# Altium footprint library Eduard.PcbLib: 54 footprints (part 2 of 4)
Each footprint in its own frame and in the unit in brackets; x right, y up, seen from the top. Pads: shape width x height; smd on the part's side, far side on the other; paste and mask are expansions set on the pad; w line width, h text height; cw(c..) or ccw(c..) is an arc to the next point about the centre after c.
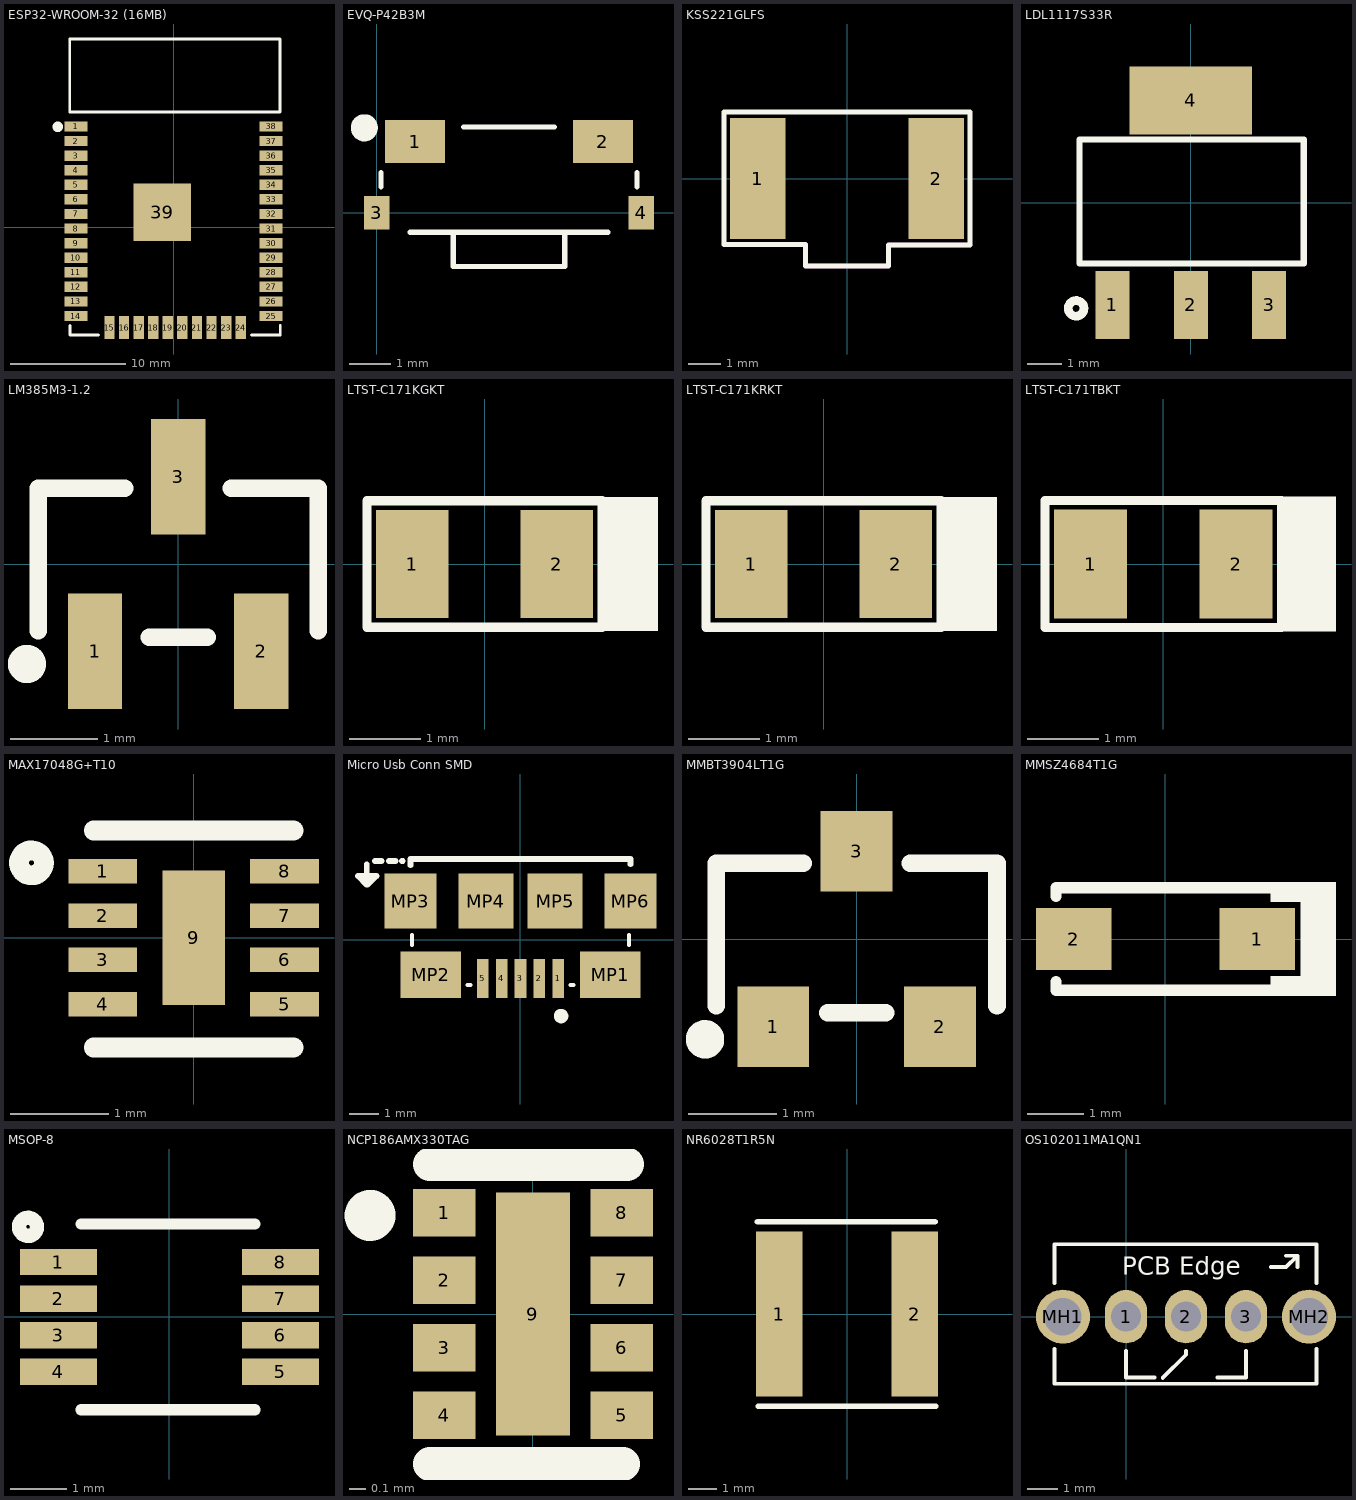
[diagram p1: the footprints below, top view; thin cyan lines are the x and y axes]

## ESP32-WROOM-32 (16MB) [mm]
pads (39):
  rect 2x0.9 smd: 1(-8.5,8.755) 2(-8.5,7.485) 3(-8.5,6.215) 4(-8.5,4.945) 5(-8.5,3.675) 6(-8.5,2.405) 7(-8.5,1.135) 8(-8.5,-0.135) 9(-8.5,-1.405) 10(-8.5,-2.675) 11(-8.5,-3.945) 12(-8.5,-5.215) 13(-8.5,-6.485) 14(-8.5,-7.755) 25(8.5,-7.755) 26(8.5,-6.485) 27(8.5,-5.215) 28(8.5,-3.945) 29(8.5,-2.675) 30(8.5,-1.405) 31(8.5,-0.135) 32(8.5,1.135) 33(8.5,2.405) 34(8.5,3.675) 35(8.5,4.945) 36(8.5,6.215) 37(8.5,7.485) 38(8.5,8.755)
  rect 0.9x2 smd: 15(-5.58,-8.755) 16(-4.31,-8.755) 17(-3.04,-8.755) 18(-1.77,-8.755) 19(-0.5,-8.755) 20(0.77,-8.755) 21(2.04,-8.755) 22(3.31,-8.755) 23(4.58,-8.755) 24(5.85,-8.755)
  rect 5x5 smd: 39(-0.991,1.27)
Top Overlay:
  circle w0.5: c-10.079,8.725 r0.205
  lines w0.254: -9.033,10.025 9.28,10.025 9.28,16.361 9.266,16.375 -9.033,16.375 ; -9.033,10.033 -9.033,16.375 -9.033,16.375 ; -9.017,-8.585 -9.017,-9.398 -6.528,-9.398 ; 6.807,-9.398 9.296,-9.398 9.296,-8.585 ; -9.033,16.375 -9.033,16.375
3D body "User Library-esp-wroom-32.step": height 3.01, standoff -0.03, extent -8.908,-9.296 9.162,16.244

## EVQ-P42B3M [mm]
pads (4):
  rect 1.45x1.05 smd: 1(0.925,1.725) 2(5.475,1.725)
  rect 0.62x0.82 smd: 3(0,0) 4(6.4,0)
Top Overlay:
  circle w0.35: c-0.305,2.057 r0.152
  lines w0.127: 0.1,0.625 0.1,0.975 ; 0.8,-0.475 5.6,-0.475 ; 1.85,-0.525 1.85,-1.3 4.55,-1.3 4.55,-0.525 ; 2.1,2.075 4.3,2.075 ; 6.3,0.625 6.3,0.975

## KSS221GLFS [mm] "Tactile Switch SPST-NO Side Actuated Surface Mount, Right Angle"
height 1.7
pads (2):
  rect 1.7x3.7 smd: 1(-2.725,0) 2(2.725,0)
Top Overlay:
  lines w0.152: -3.759,-2.007 -3.759,2.032 3.759,2.032 3.759,-2.032 1.27,-2.032 1.27,-2.667 -1.27,-2.667 -1.27,-2.007 -3.759,-2.007
Keep-Out Layer:
  lines w0.152: -3.759,-2.007 -1.27,-2.007 -1.27,-2.667 1.27,-2.667 1.27,-2.032 3.759,-2.032
3D body "KSS221GLFS.stp": height 1.65, standoff 0, extent -3.5,-2.574 3.5,1.836

## LDL1117S33R [mm] "IC REG LINEAR 3.3V 1.2A SOT223"
pads (4):
  rect 1x2 smd: 1(-2.3,-3.002) 2(0,-3.002) 3(2.3,-3.002)
  rect 3.6x2 smd: 4(0,3.002)
Top Overlay:
  circle w0.254: c-3.367,-3.103 r0.23
  lines w0.178: 3.263,-1.782 -3.265,-1.782 -3.265,1.85 3.313,1.85 3.313,-1.782
3D body "SW3dPS-SOT-223-1.STEP": height 1.54, standoff -0.11, extent -3.237,-3.454 3.263,3.546

## LM385M3-1.2 [mm]
pads (3):
  rect 0.62x1.32 smd: 1(-0.95,-1) 2(0.95,-1) 3(0,1)
Top Overlay:
  circle w0.254: c-1.727,-1.143 r0.092
  lines w0.2: -1.6,-0.762 -1.6,0.864 -0.61,0.864 ; -0.33,-0.838 0.33,-0.838 ; 0.61,0.864 1.6,0.864 1.6,-0.762
3D body "CircuitWorks-SOT-23.step": height 1.1, standoff 0, extent -1.5,-1.25 1.5,1.25

## LTST-C171KGKT [mil] "LED GREEN CLEAR SMD 0805"
pads (2):
  rect 40x60 smd: 1(-40,0) 2(40,0)
Top Overlay:
  region: 96,37 64,37 64,-37 96,-37
  lines w5: -65,-35 -65,35 65,35 65,-35 -65,-35
3D body "User Library-User Library-led_0805 GRE.step": height 43.31, standoff 0, extent -39.77,-24.61 39.76,24.6

## LTST-C171KRKT [mil] "LED RED CLEAR SMD 0805"
pads (2):
  rect 40x60 smd: 1(-40,0) 2(40,0)
Top Overlay:
  region: 96,37 64,37 64,-37 96,-37
  lines w5: -65,-35 -65,35 65,35 65,-35 -65,-35
3D body "User Library-User Library-led_0805 GRE.step": height 43.31, standoff 0, extent -39.77,-24.61 39.76,24.6

## LTST-C171TBKT [mil] "LED BLUE CLEAR SMD 0805"
pads (2):
  rect 40x60 smd: 1(-40,0) 2(40,0)
Top Overlay:
  region: 95,37 64,37 64,-37 95,-37
  lines w5: -65,-35 -65,35 65,35 65,-35 -65,-35
3D body "User Library-User Library-led_0805 GRE.step": height 43.31, standoff 0, extent -39.77,-24.61 39.76,24.6

## MAX17048G+T10 [mm]
pads (9):
  rect 0.7x0.25 smd: 1(-0.925,0.675) 2(-0.925,0.225) 3(-0.925,-0.225) 4(-0.925,-0.675) 5(0.925,-0.675) 6(0.925,-0.225) 7(0.925,0.225) 8(0.925,0.675)
  rect 0.64x1.37 smd: 9(0,0)
Top Overlay:
  circle w0.2: c-1.651,0.762 r0.127
  lines w0.2: -1.016,-1.118 1.016,-1.118 ; -1.016,1.092 1.016,1.092
3D body "User Library-DFN 8.step": height 0.76, standoff -0.04, extent -1.001,-1.009 1.001,0.991

## Micro Usb Conn SMD [mm] "CONN RCPT USB2.0 MICRO B SMD R/A"
pads (11):
  rect 0.4x1.35 smd: 1(1.3,-1.338) 2(0.65,-1.338) 3(0,-1.338) 4(-0.65,-1.338) 5(-1.3,-1.338)
  rect 2.1x1.6 smd: MP1(3.1,-1.212) MP2(-3.1,-1.212)
  rect 1.8x1.9 smd: MP3(-3.8,1.338) MP6(3.8,1.338)
  rect 1.9x1.9 smd: MP4(-1.2,1.338) MP5(1.2,1.338)
Top Overlay:
  circle w0.3: c1.4,-2.638 r0.1
  lines w0.127: -3.75,-0.188 -3.75,0.162 ; -1.83,-1.563 -1.72,-1.563 ; 1.72,-1.563 1.83,-1.563 ; 3.75,-0.188 3.75,0.162
  lines w0.2: -5.309,2.611 -5.309,1.9 -5.613,2.204 -4.978,2.204 -5.283,1.9 ; -5.029,2.718 -4.801,2.718 ; -4.547,2.718 -4.318,2.718 ; -4.089,2.718 -4.064,2.718 ; -3.8,2.575 -3.8,2.788 3.8,2.788 3.8,2.611
3D body "10118192C.stp": height 2.74, standoff -0.27, extent -3.95,-1.575 3.962,4.086

## MMBT3904LT1G [mm] "TRANS NPN 40V 0.2A SOT23"
pads (3):
  rect 0.82x0.92 smd: 1(-0.95,-1) 2(0.95,-1) 3(0,1)
Top Overlay:
  circle w0.254: c-1.727,-1.143 r0.092
  lines w0.2: -1.6,-0.762 -1.6,0.864 -0.61,0.864 ; -0.33,-0.838 0.33,-0.838 ; 0.61,0.864 1.6,0.864 1.6,-0.762
3D body: height 0.25, standoff 0, extent -1.6,-0.711 1.626,0.838

## MMSZ4684T1G [mm] "DIODE ZENER 3.3V 500MW SOD123"
pads (2):
  rect 1.35x1.1 smd: 1(1.638,0) 2(-1.638,0)
Top Overlay:
  rectangle: 1.88,0.66 2.413,1.016
  rectangle: 1.88,-1.016 2.413,-0.66
  rectangle: 2.413,-1.016 3.048,1.016
  lines w0.2: -1.956,-0.762 -1.956,-0.914 1.88,-0.914 ; -1.956,0.762 -1.956,0.914 1.88,0.914
3D body "CircuitWorks-SOD123.step": height 1.27, standoff 0, extent -1.824,-0.8 1.876,0.8

## MSOP-8 [mm]
pads (8):
  rect 1.37x0.47 smd: 1(-1.975,0.975) 2(-1.975,0.325) 3(-1.975,-0.325) 4(-1.975,-0.975) 5(1.975,-0.975) 6(1.975,-0.325) 7(1.975,0.325) 8(1.975,0.975)
Top Overlay:
  circle w0.254: c-2.515,1.6 r0.161
  lines w0.2: -1.575,-1.651 1.524,-1.651 ; -1.575,1.651 1.524,1.651
3D body "User Library-MSOP8.step": height 1, standoff -0.1, extent -2.469,-1.55 2.469,1.55

## NCP186AMX330TAG [mm]
pads (9):
  rect 0.37x0.28 smd: 1(-0.525,0.6) 2(-0.525,0.2) 3(-0.525,-0.2) 4(-0.525,-0.6) 5(0.525,-0.6) 6(0.525,-0.2) 7(0.525,0.2) 8(0.525,0.6)
  rect 0.44x1.44 smd: 9(0,0)
Top Overlay:
  circle w0.2: c-0.965,0.584 r0.051
  lines w0.2: -0.61,-0.889 0.533,-0.889 ; -0.61,0.889 0.559,0.889
3D body ".stp": height 0.39, standoff -0.01, extent -0.6,-0.8 0.6,0.8

## NR6028T1R5N [mm] "FIXED IND 1.5UH 4.2A 20.8 MOHM"
pads (2):
  rect 1.62x5.72 smd: 1(-2.35,0) 2(2.35,0)
Top Overlay:
  lines w0.2: -3.112,3.2 3.06,3.2 ; -3.086,-3.2 3.087,-3.2
3D body "IND_TAIYO_NR6028.step": height 2.79, standoff 0, extent -3.112,-3.101 3.086,3.101

## OS102011MA1QN1 [mm] "2 Position SPDT Miniature Slide Switch 100MA 12V Through Hole, Right Angle"
pads (5):
  oval 1.4x1.778 hole 1: 1(0,0) 2(2,0) 3(4,0)
  round 1.8 hole 1.25: MH1(-2.1,0) MH2(6.1,0)
Top Overlay:
  lines w0.127: -2.388,-1.067 -2.388,-2.235 6.35,-2.235 6.35,-1.067 ; -2.388,1.118 -2.388,2.413 6.35,2.413 6.35,1.118 ; 0,-1.143 0,-2.032 0.952,-2.032 ; 1.222,-2.048 2,-1.27 2,-1.143 ; 3.048,-2.032 4,-2.032 4,-1.143 ; 4.826,1.651 5.334,1.651 5.715,2.032 ; 5.334,2.032 5.715,2.032 ; 5.715,1.651 5.715,2.032
  text "PCB Edge" at -0.127,1.397 h0.6
3D body "User Library-CK_Slide.step": height 4.71, standoff -2.78, extent -2.324,-2.184 6.287,6.188